# Altium footprint library CAP-SMD_D8.0-H10.5.PcbLib: 1 footprints
Each footprint in its own frame and in the unit in brackets; x right, y up, seen from the top. Pads: shape width x height; smd on the part's side, far side on the other; paste and mask are expansions set on the pad; w line width, h text height; cw(c..) or ccw(c..) is an arc to the next point about the centre after c.
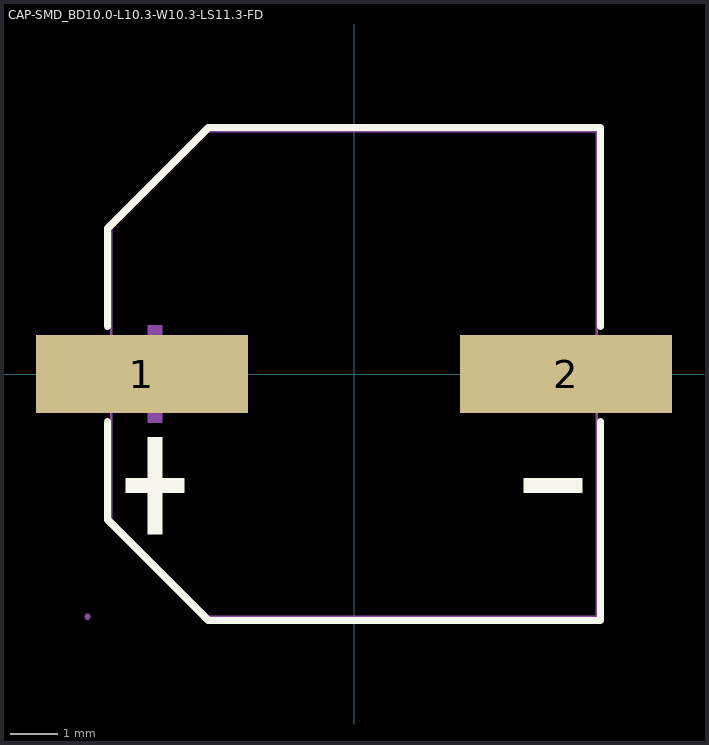
[diagram p0: the footprint, top view; thin cyan lines are the x and y axes]

## CAP-SMD_BD10.0-L10.3-W10.3-LS11.3-FD [mm]
pads (2):
  rect 4.5x1.65 smd: 1(-4.5,0) 2(4.5,0)
Top Overlay:
  region: 4.841,-2.214 4.841,-2.523 3.605,-2.523 3.605,-2.214
  region: -4.841,-2.214 -4.841,-2.523 -3.605,-2.523 -3.605,-2.214
  region: -4.378,-1.339 -4.378,-3.399 -4.068,-3.399 -4.068,-1.339
  lines w0.152: -5.226,-1.005 -5.226,-3.09 -3.09,-5.226 5.226,-5.226 5.226,-1.005 ; -5.226,1.005 -5.226,3.09 -3.09,5.226 5.226,5.226 5.226,1.005
Mechanical 6:
  region: 4.841,0.155 4.841,-0.155 3.605,-0.155 3.605,0.155
  region: -4.841,0.155 -4.841,-0.155 -3.605,-0.155 -3.605,0.155
  region: -4.378,1.03 -4.378,-1.03 -4.068,-1.03 -4.068,1.03
Mechanical 7:
  lines w0.051: -5.15,-3.09 -5.15,3.09 -3.09,5.15 5.15,5.15 5.15,-5.15 -3.09,-5.15 -5.15,-3.09
Mechanical 8:
  region: -5.59,-5.15 -5.59,-5.175 -5.625,-5.21 -5.675,-5.21 -5.71,-5.175 -5.71,-5.15 -5.71,-5.125 -5.675,-5.09 -5.625,-5.09 -5.59,-5.125 -5.59,-5.15
Mechanical 9:
  region: -5.65,0.475 -2.3,0.475 -2.3,-0.475 -5.65,-0.475
  region: 2.3,0.475 5.65,0.475 5.65,-0.475 2.3,-0.475